# Altium schematic symbol library Zlacze_ARK.SchLib: 1 symbol
Pins are listed as number, name and electrical type; pins without a type are passive.

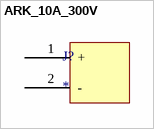
[diagram p0: symbol ARK_10A_300V]

## ARK_10A_300V
designator J?
footprint ARK_10A_300V
pins: 1 +, 2 -